# Altium schematic symbol library OPA2310IDR.SchLib: 1 symbol
Pins are listed as number, name and electrical type; pins without a type are passive.

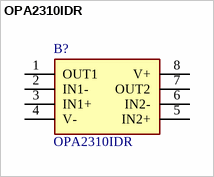
[diagram p0: symbol OPA2310IDR]

## OPA2310IDR
designator B?
General Purpose Amplifier 2 Circuit Rail-to-Rail 8-SOIC; Manufacturer_Name: Texas Instruments; Geometry.Height: 1.75mm; Mouser Part Number: 595-OPA2310IDR; Mouser Price/Stock: https://www.mouser.co.uk/ProductDetail/Texas-Instruments/OPA2310IDR?qs=vvQtp7zwQdO7M4WMfM7rQg%3D%3D; Manufacturer_Part_Number: OPA2310IDR; Datasheet Link: https://www.ti.com/lit/ds/symlink/opa2310.pdf?HQS=dis-mous-null-mousermode-dsf-pf-null-wwe&ts=1664810239166&ref_url=https%253A%252F%252Fwww.mouser.co.il%252F
footprint SOIC127P600X175-8N
pins: 1 OUT1, 2 IN1-, 3 IN1+, 4 V-, 5 IN2+, 6 IN2-, 7 OUT2, 8 V+